# Altium footprint library Passive-Ind.PcbLib: 61 footprints (part 3 of 4)
Each footprint in its own frame and in the unit in brackets; x right, y up, seen from the top. Pads: shape width x height; smd on the part's side, far side on the other; paste and mask are expansions set on the pad; w line width, h text height; cw(c..) or ccw(c..) is an arc to the next point about the centre after c.
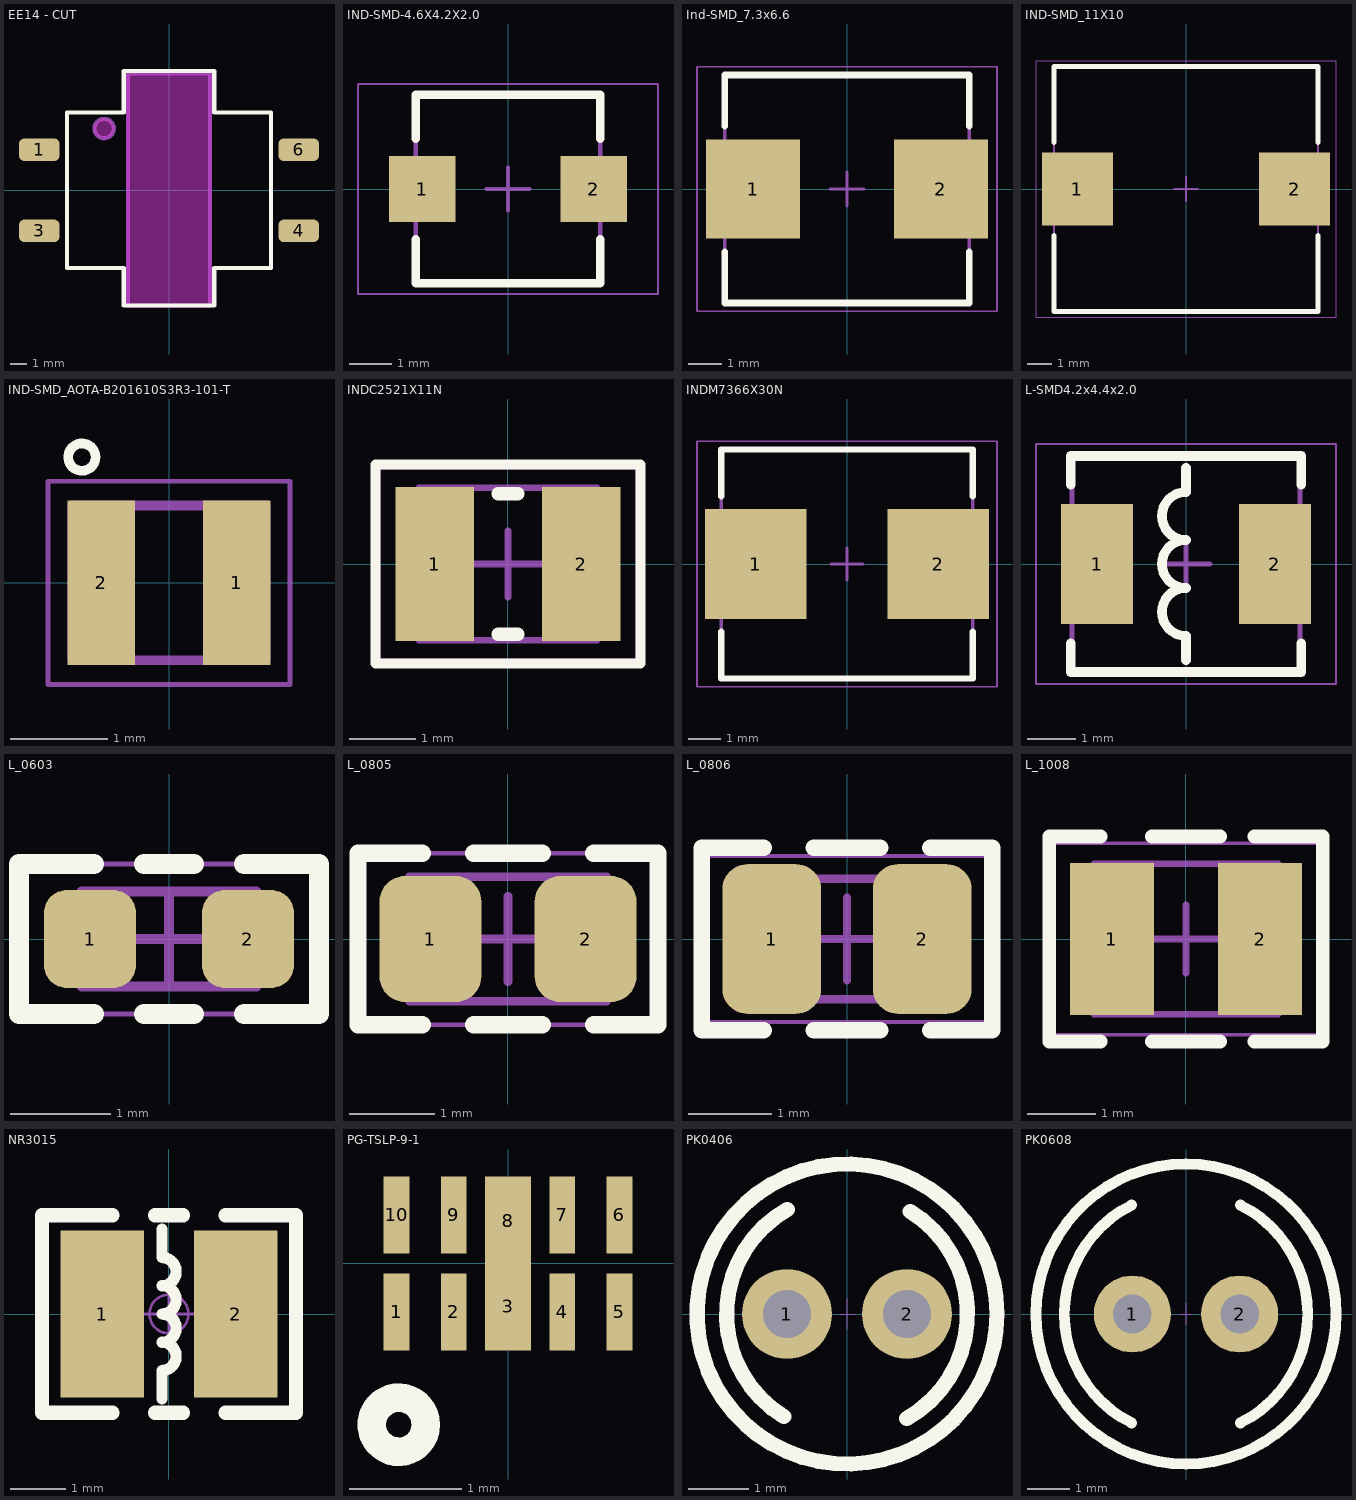
[diagram p2: the footprints below, top view; thin cyan lines are the x and y axes]

## EE14 - CUT [mm]
pads (4):
  rrect50% 2.5x1.4 smd: 1(-8,2.5) 3(-8,-2.5) 4(8,-2.5) 6(8,2.5)
Top Overlay:
  lines w0.254: -6.3,-4.8 -6.3,4.8 -2.794,4.8 -2.794,7.366 2.794,7.366 2.794,4.8 6.3,4.8 6.3,-4.8 2.794,-4.8 2.794,-7.112 -2.794,-7.112 -2.794,-4.8 -6.3,-4.8
Keep-Out Layer:
  board cut-out: -4,3.21 -4.119,3.21 -4.34,3.301 -4.509,3.47 -4.6,3.691 -4.6,3.81 -4.6,3.929 -4.509,4.15 -4.34,4.319 -4.119,4.41 -4,4.41 -3.881,4.41 -3.66,4.319 -3.491,4.15 -3.4,3.929 -3.4,3.81 -3.4,3.691 -3.491,3.47 -3.66,3.301 -3.881,3.21
  board cut-out: -2.6,-7.2 -2.6,7.2 2.6,7.2 2.6,-7.2
Board Outline:
  circle w0.254: c-4,3.81 r0.6
  lines w0.254: -2.54,-7.112 2.54,-7.112 2.54,7.2 -2.54,7.2 -2.54,-7.112
Top Designator:
  text ".Designator" at 7.618,-0.381 h1.52

## IND-SMD-4.6X4.2X2.0 [mm] "Molded Inductor, 2-Leads, Body 4.60x4.20mm, IPC Medium Density"
height 2
pads (2):
  rect 1.55x1.55 smd: 1(-2,0) 2(2,0)
Top Overlay:
  lines w0.2: -2.15,-1.175 -2.15,-2.2 2.15,-2.2 2.15,-1.175 ; -2.15,1.175 -2.15,2.2 2.15,2.2 2.15,1.175
Top Value:
  text "'.Comment'" at -2.108,-0.432 h1.6
Top Designator:
  text "'.Designator'" at -5.721,-0.419 h2
Top Courtyard:
  lines w0.05: -3.5,-2.45 3.5,-2.45 3.5,2.45 -3.5,2.45 -3.5,-2.45
  lines w0.1: -0.5,0 0.5,0 ; 0,-0.5 0,0.5
Top Assembly (Mech20):
  lines w0.1: -2.15,-2.2 2.15,-2.2 2.15,2.2 -2.15,2.2 -2.15,-2.2
3D body "INDM4642X20N.step": height 2, standoff 0, extent -2.37,-2.2 2.37,2.2

## Ind-SMD_7.3x6.6 [mm] "Molded Inductor, 2-Leads, Body 7.30x6.60mm, IPC Medium Density"
height 3
pads (2):
  rect 2.8x2.95 smd: 1(-2.8,0) 2(2.8,0)
Top Overlay:
  lines w0.2: -3.65,-1.875 -3.65,-3.4 3.65,-3.4 3.65,-1.875 ; -3.65,1.875 -3.65,3.4 3.65,3.4 3.65,1.875
Top Value:
  text "'.Comment'" at -2.108,-0.432 h1.6
Top Designator:
  text "'.Designator'" at -5.721,-0.419 h2
Top Courtyard:
  lines w0.05: -4.475,-3.65 -4.475,3.65 4.475,3.65 4.475,-3.65 -4.475,-3.65
  lines w0.1: -0.5,0 0.5,0 ; 0,-0.5 0,0.5
Top Assembly (Mech20):
  lines w0.1: -3.65,-3.4 -3.65,3.4 3.65,3.4 3.65,-3.4 -3.65,-3.4
3D body "SRP7028A-7.3x6.6x3.stp": height 2.81, standoff -0.02, extent -3.453,-3.299 3.447,3.301

## IND-SMD_11X10 [mm] "Molded Inductor, 2-Leads, Body 10.80x10.00mm, IPC Medium Density"
height 4
pads (2):
  rect 2.95x3.05 smd: 1(-4.525,0) 2(4.525,0)
Top Overlay:
  lines w0.2: -5.5,-1.925 -5.5,-5.1 5.5,-5.1 5.5,-1.925 ; -5.5,1.925 -5.5,5.1 5.5,5.1 5.5,1.925
Top Value:
  text "'.Comment'" at -2.108,-0.432 h1.6
Top Designator:
  text "'.Designator'" at -5.721,-0.419 h2
Top Courtyard:
  lines w0.05: -6.25,-5.35 6.25,-5.35 6.25,5.35 -6.25,5.35 -6.25,-5.35
  lines w0.1: -0.5,0 0.5,0 ; 0,-0.5 0,0.5
Top Assembly (Mech20):
  lines w0.1: -5.5,-5.1 5.5,-5.1 5.5,5.1 -5.5,5.1 -5.5,-5.1
3D body "SRP1040VA SERIES.stp": height 3.81, standoff 0, extent -5.5,-4.9 5.5,5.1

## IND-SMD_AOTA-B201610S3R3-101-T [mm] "品牌名称 / ABRACON / 商品型号 / AOTA-B201610S3R3-101-T"
pads (2):
  rect 0.7x1.7 smd paste+0 mask+0: 1(0.7,0) 2(-0.7,0)
Top Overlay:
  circle w0.1: c-0.9,1.3 r0.141
Top Component Center:
  lines w0.05: -1.25,-1.05 1.25,-1.05 1.25,1.05 -1.25,1.05 -1.25,-1.05
Top Value:
  text "'.Comment'" at -1.843,-0.378 h1.4
Top Designator:
  text "'.Designator'" at -4.579,-0.335 h1.6
Bottom Courtyard:
  circle w0.1: c-0.7,0 r0.224
  lines w0.1: -1,-0.8 1,-0.8 1,0.8 -1,0.8 -1,-0.8
3D body "AOTA-B201610S3R3-101-T.stp": height 1, standoff 0, extent -1,-0.8 1,0.8

## INDC2521X11N [mm] "Chip Inductor, 2-Leads, Body 2.50x2.10mm, IPC Medium Density"
height 1.1
pads (2):
  rect 1.19x2.32 smd: 1(-1.105,0) 2(1.105,0)
Top Overlay:
  lines w0.152: -2,-1.5 2,-1.5 2,1.5 -2,1.5 -2,-1.5
  lines w0.2: -0.15,-1.06 0.15,-1.06 ; -0.15,1.06 0.15,1.06
Top Courtyard:
  lines w0.05: -1.95,-1.45 -1.95,1.45 1.95,1.45 1.95,-1.45 -1.95,-1.45
  lines w0.1: -0.5,0 0.5,0 ; 0,-0.5 0,0.5
Top Assembly (Mech20):
  lines w0.1: -1.35,-1.15 -1.35,1.15 1.35,1.15 1.35,-1.15 -1.35,-1.15
3D body: height 1.1, standoff 0, extent -0.85,-1.15 0.85,1.15
3D body: height 1.1, standoff 0, extent -1.35,-1.15 -0.85,1.15
3D body: height 1.1, standoff 0, extent 0.85,-1.15 1.35,1.15

## INDM7366X30N [mm] "Molded Inductor, 2-Leads, Body 7.30x6.60mm, IPC Medium Density"
height 3
pads (2):
  rect 3.15x3.4 smd: 1(-2.825,0) 2(2.825,0)
Top Overlay:
  lines w0.2: -3.9,-2.1 -3.9,-3.55 3.9,-3.55 3.9,-2.1 ; -3.9,2.1 -3.9,3.55 3.9,3.55 3.9,2.1
Top Value:
  text "'.Comment'" at -4.314,-0.581 h2
Top Designator:
  text "'.Designator'" at -5.721,-0.419 h2
Top Courtyard:
  lines w0.05: -4.65,-3.8 -4.65,3.8 4.65,3.8 4.65,-3.8 -4.65,-3.8
  lines w0.1: -0.5,0 0.5,0 ; 0,-0.5 0,0.5
Top Assembly (Mech20):
  lines w0.1: -3.9,-3.55 -3.9,3.55 3.9,3.55 3.9,-3.55 -3.9,-3.55
3D body: height 3, standoff 0, extent -3.9,-3.55 3.9,3.55

## L-SMD4.2x4.4x2.0 [mm] "Molded Inductor, 2-Leads, Body 4.40x4.20mm, IPC Medium Density"
height 1
pads (2):
  rect 1.5x2.5 smd: 1(-1.85,0) 2(1.85,0)
Top Overlay:
  lines w0.2: -2.4,-1.65 -2.4,-2.25 2.4,-2.25 2.4,-1.65 ; -2.4,1.65 -2.4,2.25 2.4,2.25 2.4,1.65 ; 0,-2 0,-1.5 cw(c0,-1) -0.5,-1 cw(c0,-1) 0,-0.5 cw(c0,0) -0.5,0 cw(c0,0) 0,0.5 cw(c0,1) -0.5,1 cw(c0,1) 0,1.5 0,2
Top Courtyard:
  lines w0.05: -3.125,-2.5 -3.125,2.5 3.125,2.5 3.125,-2.5 -3.125,-2.5
  lines w0.1: -0.5,0 0.5,0 ; 0,-0.5 0,0.5
Top Assembly (Mech20):
  lines w0.1: -2.375,-2.225 -2.375,2.225 2.375,2.225 2.375,-2.225 -2.375,-2.225
3D body: height 1, standoff 0, extent -2.375,-2.225 2.375,2.225

## L_0603 [mm] "Chip Inductor, 2-Leads, Body 1.60x0.80mm, IPC Medium Density"
height 0.8
pads (2):
  rrect50% 0.92x0.98 smd: 1(-0.79,0) 2(0.79,0)
Top Overlay:
  lines w0.2: -0.75,-0.75 -1.5,-0.75 -1.5,0.75 -0.75,0.75 ; -0.25,-0.75 0.25,-0.75 ; -0.25,0.75 0.25,0.75 ; 0.75,-0.75 1.5,-0.75 1.5,0.75 0.75,0.75
Top Value:
  text "'.Comment'" at -1.317,-0.27 h1
Top Designator:
  text "'.Designator'" at -3.437,-0.252 h1.2
Top Courtyard:
  lines w0.05: -1.5,-0.75 1.5,-0.75 1.5,0.75 -1.5,0.75 -1.5,-0.75
  lines w0.1: -0.475,0 0.475,0 ; 0,-0.475 0,0.475
Top Assembly (Mech20):
  lines w0.1: -0.875,-0.475 0.875,-0.475 0.875,0.475 -0.875,0.475 -0.875,-0.475
3D body "INDC-0603.stp": height 0.95, standoff 0, extent -0.875,-0.475 0.875,0.475

## L_0805 [mm] "Chip Inductor, 2-Leads, Body 2.10x1.25mm, IPC Medium Density"
height 1.25
pads (2):
  rrect50% 1.19x1.47 smd: 1(-0.905,0) 2(0.905,0)
Top Overlay:
  lines w0.2: -1,-1 -1.75,-1 -1.75,1 -1,1 ; -0.4,-1 0.4,-1 ; -0.4,1 0.4,1 ; 1,-1 1.75,-1 1.75,1 1,1
Top Value:
  text "'.Comment'" at -1.843,-0.378 h1.4
Top Designator:
  text "'.Designator'" at -4.579,-0.335 h1.6
Top Courtyard:
  lines w0.05: -1.75,-1 -1.75,1 1.75,1 1.75,-1 -1.75,-1
  lines w0.1: -0.5,0 0.5,0 ; 0,-0.5 0,0.5
Top Assembly (Mech20):
  lines w0.1: -1.15,-0.725 -1.15,0.725 1.15,0.725 1.15,-0.725 -1.15,-0.725
3D body "INDC-0805-T1.05.stp": height 1.05, standoff 0, extent -1.1,-0.725 1.1,0.725

## L_0806 [mm]
height 1.25
pads (2):
  rrect50% 1.19x1.8 smd: 1(-0.905,0) 2(0.905,0)
Top Overlay:
  lines w0.2: -1,-1.1 -1.75,-1.1 -1.75,1.1 -1,1.1 ; -0.4,-1.1 0.4,-1.1 ; -0.4,1.1 0.4,1.1 ; 1,-1.1 1.75,-1.1 1.75,1.1 1,1.1
Top Value:
  text "'.Comment'" at -1.843,-0.378 h1.4
Top Designator:
  text "'.Designator'" at -4.579,-0.335 h1.6
Top Courtyard:
  lines w0.05: -1.75,-1 -1.75,1 1.75,1 1.75,-1 -1.75,-1
  lines w0.1: -0.5,0 0.5,0 ; 0,-0.5 0,0.5
Top Assembly (Mech20):
  lines w0.1: -1.15,-0.725 -1.15,0.725 1.15,0.725 1.15,-0.725 -1.15,-0.725
3D body "INDC-0805-T1.05.stp": height 1.05, standoff 0, extent -1.1,-0.725 1.1,0.725

## L_1008 [mm] "Chip Inductor, 2-Leads, Body 2.50x2.00mm, IPC Medium Density"
height 1.2
pads (2):
  rect 1.23x2.22 smd: 1(-1.085,0) 2(1.085,0)
Top Overlay:
  lines w0.2: -1.25,-1.5 -2,-1.5 -2,1.5 -1.25,1.5 ; -0.5,-1.5 0.5,-1.5 ; -0.5,1.5 0.5,1.5 ; 1,-1.5 2,-1.5 2,1.5 1,1.5
Top Value:
  text "'.Comment'" at -1.843,-0.378 h1.4
Top Designator:
  text "'.Designator'" at -4.579,-0.335 h1.6
Top Courtyard:
  lines w0.05: -1.95,-1.4 1.95,-1.4 1.95,1.4 -1.95,1.4 -1.95,-1.4
  lines w0.1: -0.5,0 0.5,0 ; 0,-0.5 0,0.5
Top Assembly (Mech20):
  lines w0.1: -1.35,-1.1 1.35,-1.1 1.35,1.1 -1.35,1.1 -1.35,-1.1
3D body "CVH252009.stp": height 0.9, standoff 0, extent -1.25,-1 1.25,1

## NR3015 [mm] "3mm*3mm*1.5mm(长*宽*高）"
pads (2):
  rect 1.5x3 smd: 1(-1.2,0) 2(1.2,0)
Top Overlay:
  lines w0.203: -0.127,-1.524 -0.127,-1.016 ccw(c-0.127,-0.762) -0.127,-0.508 ccw(c-0.127,-0.254) -0.127,0 ccw(c-0.127,0.254) -0.127,0.508 ccw(c-0.127,0.762) -0.127,1.016 -0.127,1.524
  lines w0.254: -1.016,-1.778 -2.286,-1.778 -2.286,1.778 -1.016,1.778 ; -0.254,-1.778 0.254,-1.778 ; -0.254,1.778 0.254,1.778 ; 1.016,-1.778 2.286,-1.778 2.286,1.778 1.016,1.778
Top Designator:
  text ".Designator" at 7.618,-0.508 h1.52
Bottom Courtyard:
  circle w0.05: c0,0 r0.35
  lines w0.05: -0.5,0 0.5,0 ; 0,-0.5 0,0.5
3D body "NR3015.STEP": height 1.45, standoff 0.05, extent -1.524,-1.5 1.476,1.5

## PG-TSLP-9-1 [mil]
pads (10):
  rect 9x27 smd: 1(-39,-17) 2(-19,-17) 4(19,-17) 5(39,-17) 6(39,17) 7(19,17) 9(-19,17) 10(-39,17)
  rect 16x31 smd: 3(0,-15) 8(0,15)
Top Overlay:
  circle w10: c-38.22,-56.45 r9.46
Top Designator:
  text ".Designator" at 298.71,-36.58 h60
3D body: height 12.2, standoff 0, extent -49.24,-38.14 50.29,37.73

## PK0406 [mm] "2*5*8mm(脚距，直径，高）"
pads (2):
  round 1.5 hole 0.8: 1(-1,0) 2(1,0)
Top Overlay:
  circle w0.254: c0,0 r2.5
  lines w0.254: -1.052,-1.71 cw(c0,0) -0.996,1.743 ; 0.996,-1.743 ccw(c0,0) 1.052,1.71
Top Designator:
  text ".Designator" at 7.618,-0.508 h1.52
Bottom Courtyard:
  lines w0.01: -0.127,0 0.127,0 ; 0,-0.254 0,0.254
3D body "PK0406.STEP": height 8.02, standoff -2.78, extent -2.5,-2.54 2.5,2.46

## PK0608 [mm] "2.5*7*10mm(脚距，直径，高）"
pads (2):
  round 1.8 hole 0.9: 1(-1.25,0) 2(1.25,0)
Top Overlay:
  circle w0.254: c0,0 r3.5
  lines w0.254: -1.27,-2.54 cw(c0,0) -1.27,2.54 ; 1.27,-2.54 ccw(c0,0) 1.27,2.54
Top Designator:
  text ".Designator" at 7.618,-0.508 h1.52
Bottom Courtyard:
  lines w0.01: -0.127,0 0.127,0 ; 0,-0.254 0,0.254
3D body "PK0608.STEP": height 10.02, standoff -2.78, extent -3.5,-3.556 3.5,3.444